# Altium schematic symbol library AMC3330DWE.SchLib: 1 symbol
Pins are listed as number, name and electrical type; pins without a type are passive.

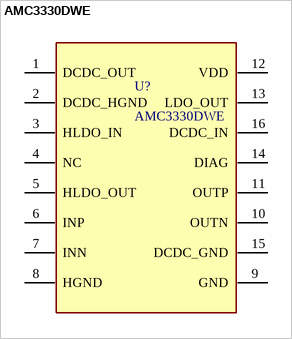
[diagram p0: symbol AMC3330DWE]

## AMC3330DWE
designator U?
footprint SOIC127P1030X265-16N
footprint FP-DW0016B-IPC_A
footprint FP-DW0016B-IPC_B
footprint FP-DW0016B-IPC_C
footprint FP-DW0016B-MFG
pins: 1 DCDC_OUT, 2 DCDC_HGND, 3 HLDO_IN, 4 NC, 5 HLDO_OUT, 6 INP, 7 INN, 8 HGND, 9 GND, 10 OUTN, 11 OUTP, 12 VDD, 13 LDO_OUT, 14 DIAG, 15 DCDC_GND, 16 DCDC_IN